# Altium schematic symbol library FERRITE - GENERIC.SchLib: 1 symbol
Pins are listed as number, name and electrical type; pins without a type are passive.

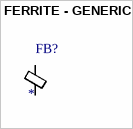
[diagram p0: symbol FERRITE - GENERIC]

## FERRITE - GENERIC
designator FB?
FERRITE - GENERIC
footprint L0603 - GENERIC (Huella L0603 - GENERIC)
pins: 1, 2